# Altium schematic symbol library Mikrokontroler.SchLib: 1 symbol
Pins are listed as number, name and electrical type; pins without a type are passive.

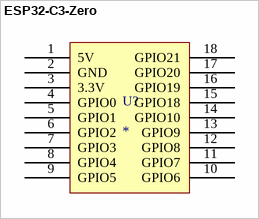
[diagram p0: symbol ESP32-C3-Zero]

## ESP32-C3-Zero
designator U?
footprint ESP32-C3-Zero
pins: 1 5V, 2 GND, 3 3.3V, 4 GPIO0, 5 GPIO1, 6 GPIO2, 7 GPIO3, 8 GPIO4, 9 GPIO5, 10 GPIO6, 11 GPIO7, 12 GPIO8, 13 GPIO9, 14 GPIO10, 15 GPIO18, 16 GPIO19, 17 GPIO20, 18 GPIO21